# Altium footprint library Connectors.PcbLib: 51 footprints (part 4 of 4)
Each footprint in its own frame and in the unit in brackets; x right, y up, seen from the top. Pads: shape width x height; smd on the part's side, far side on the other; paste and mask are expansions set on the pad; w line width, h text height; cw(c..) or ccw(c..) is an arc to the next point about the centre after c.
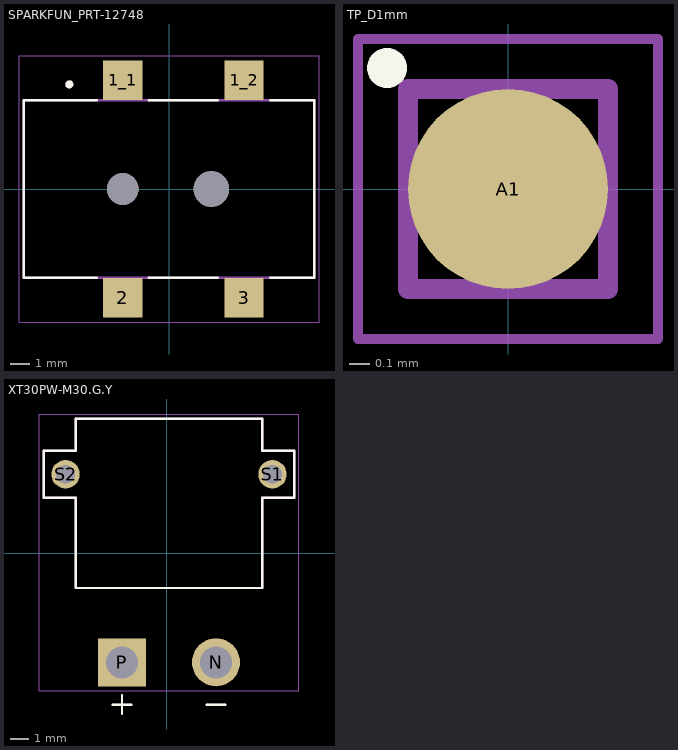
[diagram p3: the footprints below, top view; thin cyan lines are the x and y axes]

## SPARKFUN_PRT-12748 [mm]
height 11
pads (6):
  rect 2x2 smd: 1_1(-2.35,5.5) 1_2(3.8,5.5) 2(-2.35,-5.5) 3(3.8,-5.5)
  round 1.6 hole 1.6 unplated: ""(-2.35,0)
  round 1.8 hole 1.8 unplated: ""(2.15,0)
Top Overlay:
  circle w0.2: c-5.05,5.3 r0.1
  lines w0.127: -3.67,-4.5 -7.35,-4.5 -7.35,4.5 -3.67,4.5 ; -1.03,-4.5 2.48,-4.5 ; -1.03,4.5 2.48,4.5 ; 5.12,-4.5 7.35,-4.5 7.35,4.5 5.12,4.5
Mechanical 13:
  circle w0.2: c-5.05,5.3 r0.1
  lines w0.127: -7.35,-4.5 7.35,-4.5 7.35,4.5 -7.35,4.5 -7.35,-4.5
Mechanical 15:
  lines w0.05: -7.6,-6.75 -7.6,6.75 7.6,6.75 7.6,-6.75 -7.6,-6.75
3D body "step_temp.STEP": height 11, standoff -1.2, extent -9.5,-6.3 5.3,6.3

## TP_D1mm [mm]
pads (1):
  round 1 smd: A1(0,0)
Top Overlay:
  circle w0.1: c-0.605,0.605 r0.05
Mechanical 13:
  lines w0.1: -0.5,-0.5 0.5,-0.5 0.5,0.5 -0.5,0.5 -0.5,-0.5
Mechanical 15:
  lines w0.05: -0.75,-0.75 0.75,-0.75 0.75,0.75 -0.75,0.75 -0.75,-0.75
  lines w0.1: -0.5,0 0.5,0 ; 0,-0.5 0,0.5
3D body: height 0.1, standoff 0, extent -0.5,-0.5 0.5,0.5

## XT30PW-M30.G.Y [mm]
pads (4):
  round 2.55 hole 1.7: N(2.627,-5.809)
  rect 2.55x2.55 / inner round 2.55 / far side rect 2.55x2.55 hole 1.7: P(-2.373,-5.809)
  round 1.508 hole 1: S1(5.627,4.191) S2(-5.373,4.191)
Top Overlay:
  lines w0.127: -2.873,-8.059 -1.873,-8.059 ; -2.373,-8.559 -2.373,-7.559 ; 2.127,-8.059 3.127,-8.059 ; -6.523,2.941 -4.823,2.941 -4.823,-1.859 5.077,-1.859 5.077,2.941 6.777,2.941 6.777,5.441 5.077,5.441 5.077,7.141 -4.823,7.141 -4.823,5.441 -6.523,5.441 -6.523,2.941
Mechanical 13:
  lines w0.127: -2.873,-8.059 -1.873,-8.059 ; -2.373,-8.559 -2.373,-7.559 ; 2.127,-8.059 3.127,-8.059 ; -6.523,2.941 -4.823,2.941 -4.823,-1.859 5.077,-1.859 5.077,2.941 6.777,2.941 6.777,5.441 5.077,5.441 5.077,7.141 -4.823,7.141 -4.823,5.441 -6.523,5.441 -6.523,2.941
Mechanical 15:
  lines w0.05: -6.773,-7.334 -6.773,7.391 7.027,7.391 7.027,-7.334 -6.773,-7.334
3D body "step_temp.STEP": height 5, standoff -2, extent -6.523,-6.809 6.777,7.141